# Altium schematic symbol library Diode%.SchLib: 376 symbols (part 7 of 9)
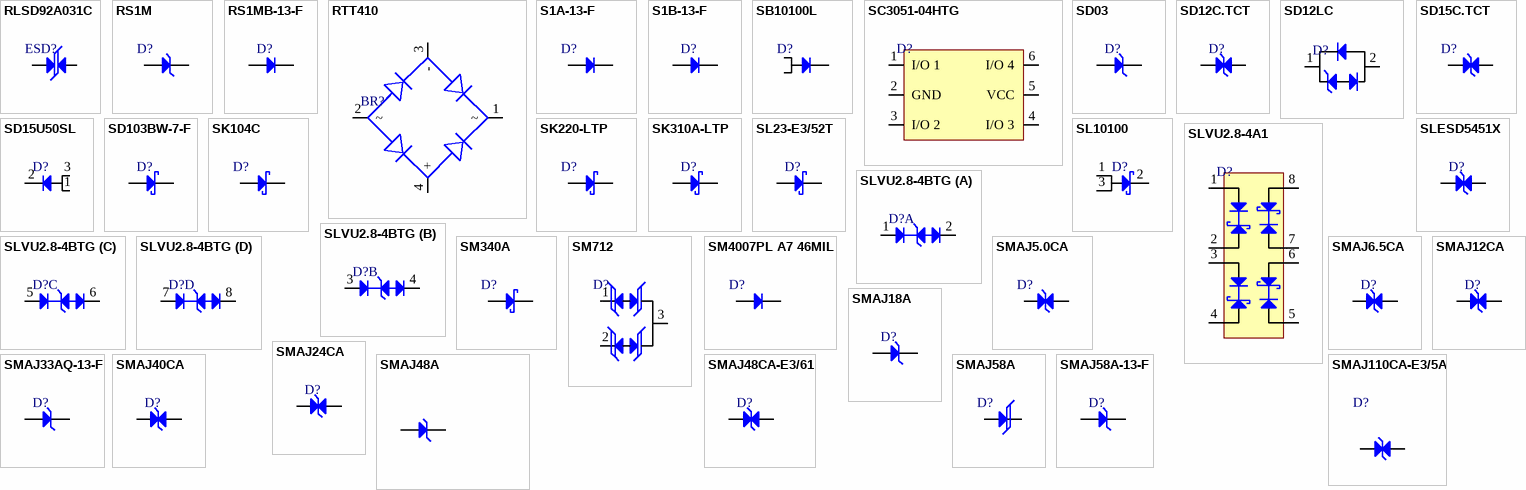
[diagram p15: symbols RLSD92A031C to SMAJ110CA-E3/5A]

## SD103BW-7-F
designator D?
DIODE SCHOTTKY 30V 350MA SOD123; Manufacturer: Diodes; Manufacturer Part Number: SD103BW-7-F; Supplier: Future Electronics; LCSC Part Number: C151400; RoHS: Yes; Item Type: Diodes; Stock: 6000; Pricing: 3000=0.0438, 9000=0.0421, 12000=0.0416, 30000=0.0403, 45000=0.039 (USD); ComponentLink1URL: https://datasheet.ciiva.com/36526/1541925-36526008.pdf?src-supplier=Jameco; ComponentLink1Description: https://datasheet.ciiva.com/36526/1541925-36526008.pdf?src-supplier=Jameco; ComponentLink2URL: https://datasheet.ciiva.com/22695/480042-22695847.pdf?src-supplier=Element14; ComponentLink2Description: https://datasheet.ciiva.com/22695/480042-22695847.pdf?src-supplier=Element14; ComponentLink3URL: https://datasheet.ciiva.com/7964/ds11013-7964329.pdf?src-supplier=Element14; ComponentLink3Description: https://datasheet.ciiva.com/7964/ds11013-7964329.pdf?src-supplier=Element14; ComponentLink4URL: https://datasheet.ciiva.com/912/ds11013-912934.pdf?src-supplier=Digikey; ComponentLink4Description: https://datasheet.ciiva.com/912/ds11013-912934.pdf?src-supplier=Digikey; ComponentLink5URL: https://datasheet.ciiva.com/912/ds11013-912935.pdf?src-supplier=Digikey; ComponentLink5Description: https://datasheet.ciiva.com/912/ds11013-912935.pdf?src-supplier=Digikey
footprint SOD-123
pins: 1 A, 2 K

## SK104C
designator D?
40V 650mV@10A 10A SMC(DO-214AB) Schottky Barrier Diodes (SBD) ROHS; Manufacturer: MDD; Manufacturer Part Number: SK104C; Item Type: Diode; Package: SMC(DO-214AB); LCSC Part Number: C59500; ComponentLink1Description: LCSC; ComponentLink1URL: https://www.lcsc.com/product-detail/Schottky-Barrier-Diodes-SBD_MDD-Microdiode-Electronics-SK104C_C59500.html
footprint SMC
pins: 1 K, 2 A

## SK220-LTP
designator D?
200V 900mV@2A 2A SMB(DO-214AA) Schottky Barrier Diodes (SBD) ROHS; Manufacturer: MCC; Manufacturer Part Number: SK220-LTP; Item Type: Diode; Supplier 1: Mouser; RoHS: Yes; Category: Rectifier Diodes; Stock 1: 5871; Pricing 1: 1=0.47, 10=0.364, 50=0.364, 100=0.227, 1000=0.12, 10000=0.092 (USD); Mounting Technology: Surface Mount; Package Quantity: 3000; Packaging: Tape and Reel; Average Rectified Current: 2A; Max Reverse Voltage (DC): 200V; Series: -; Lead Free: Lead Free; RoHS Compliant: Yes; ComponentLink1URL: https://datasheet.ciiva.com/6377/sk22-lsk220-ldo-214aa-6377942.pdf?src-supplier=Digi-Key; ComponentLink1Description: https://datasheet.ciiva.com/6377/sk22-lsk220-ldo-214aa-6377942.pdf?src-supplier=Digi-Key; Supplier Part Number 1: 833-SK220-LTP; LCSC Part Number: C725397
footprint SMB_
pins: 1 A, 2 K

## SK310A-LTP
designator D?
100V 850mV@3A 3A SMA(DO-214AC) Schottky Diodes ROHS; Manufacturer: MCC(Micro Commercial Components); Manufacturer Part Number: SK310A-LTP; Item Type: Diode; Package: SMA(DO-214AC); LCSC Part Number: C91474; ComponentLink1Description: LCSC; ComponentLink1URL: https://www.lcsc.com/product-detail/Schottky-Diodes_MCC-Micro-Commercial-Components-SK310A-LTP_C91474.html?s_z=n_SK310A
footprint SMA(DO-214AC)
pins: 1 K, 2 A

## SL23-E3/52T
designator D?
DIODE SCHOTTKY 30V 2A DO214AA; Manufacturer: Vishay Semiconductors; Manufacturer Part Number: SL23-E3/52T; Item Type: Diodes; Supplier: Mouser; LCSC Part Number: C2979790; RoHS: Yes; Stock: 2637; Pricing: 1=0.54, 10=0.363, 50=0.363, 100=0.287, 1000=0.143, 10000=0.128 (USD); ComponentLink1URL: http://www.farnell.com/datasheets/2049348.pdf?src-supplier=Farnell; ComponentLink1Description: http://www.farnell.com/datasheets/2049348.pdf?src-supplier=Farnell; ComponentLink2URL: https://www.alliedelec.com/m/d/b938cf501c2dca4289fb9d630ff5a91d.pdf?src-supplier=Allied+Electronics; ComponentLink2Description: https://www.alliedelec.com/m/d/b938cf501c2dca4289fb9d630ff5a91d.pdf?src-supplier=Allied+Electronics; ComponentLink3URL: http://www.mouser.com/ds/2/427/sl22-108295.pdf?src-supplier=Mouser; ComponentLink3Description: http://www.mouser.com/ds/2/427/sl22-108295.pdf?src-supplier=Mouser; ComponentLink4URL: http://uk.rs-online.com/webdocs/0dcf/0900766b80dcfe9f.pdf?src-supplier=Rs; ComponentLink4Description: http://uk.rs-online.com/webdocs/0dcf/0900766b80dcfe9f.pdf?src-supplier=Rs; ComponentLink5URL: http://components.arrow.com/part/dataview/42820641S9655971N5680?src-supplier=Arrow+Electronics; ComponentLink5Description: http://components.arrow.com/part/dataview/42820641S9655971N5680?src-supplier=Arrow+Electronics; ComponentLink6URL: http://www.produktinfo.conrad.com/datenblaetter/575000-599999/596314-da-01-en-DIODE_SCHOTTKY_SL23_E3_52T_DO_214AA_VIS.pdf?src-supplier=Conrad; ComponentLink6Description: http://www.produktinfo.conrad.com/datenblaetter/575000-599999/596314-da-01-en-DIODE_SCHOTTKY_SL23_E3_52T_DO_214AA_VIS.pdf?src-supplier=Conrad; ComponentLink7URL: https://datasheet.octopart.com/SL23-E3-52T-Vishay-datasheet-8479844.pdf?src-supplier=Farnell; ComponentLink7Description: https://datasheet.octopart.com/SL23-E3-52T-Vishay-datasheet-8479844.pdf?src-supplier=Farnell; ComponentLink8URL: http://www.vishay.com/docs/88741/sl22.pdf?src-supplier=Digikey; ComponentLink8Description: http://www.vishay.com/docs/88741/sl22.pdf?src-supplier=Digikey; ComponentLink9URL: https://www.vishay.com/docs/88741/sl22.pdf?src-supplier=Digikey; ComponentLink9Description: https://www.vishay.com/docs/88741/sl22.pdf?src-supplier=Digikey; ComponentLink10URL: https://datasheet.octopart.com/SL23-E3-52T-Vishay-datasheet-28809157.pdf?src-supplier=Future+Electronics; ComponentLink10Description: https://datasheet.octopart.com/SL23-E3-52T-Vishay-datasheet-28809157.pdf?src-supplier=Future+Electronics; ComponentLink11URL: http://www.vishay.com/docs/88741/88741.pdf?src-supplier=Future+Electronics; ComponentLink11Description: http://www.vishay.com/docs/88741/88741.pdf?src-supplier=Future+Electronics; ComponentLink12URL: http://www.farnell.com/datasheets/2049348.pdf?src-supplier=Element14; ComponentLink12Description: http://www.farnell.com/datasheets/2049348.pdf?src-supplier=Element14; ComponentLink13URL: http://www.vishay.com/docs/88741/88741.pdf?src-supplier=Avnet; ComponentLink13Description: http://www.vishay.com/docs/88741/88741.pdf?src-supplier=Avnet; ComponentLink14URL: https://datasheet.octopart.com/SL23-E3-52T-Vishay-datasheet-11758959.pdf?src-supplier=Element14; ComponentLink14Description: https://datasheet.octopart.com/SL23-E3-52T-Vishay-datasheet-11758959.pdf?src-supplier=Element14; ComponentLink15URL: http://www.farnell.com/datasheets/2243773.pdf?src-supplier=Newark; ComponentLink15Description: http://www.farnell.com/datasheets/2243773.pdf?src-supplier=Newark; ComponentLink16URL: http://docs-usa.electrocomponents.com/techlib:/itc_doclist_US.htm?stockno=7000940&src-supplier=Allied+Electronics; ComponentLink16Description: http://docs-usa.electrocomponents.com/techlib:/itc_doclist_US.htm?stockno=7000940&src-supplier=Allied+Electronics; ComponentLink17URL: https://datasheet.octopart.com/SL23-E3-52T-Vishay-datasheet-124739981.pdf?src-supplier=TME; ComponentLink17Description: https://datasheet.octopart.com/SL23-E3-52T-Vishay-datasheet-124739981.pdf?src-supplier=TME
footprint DO-214AA (SMB)
pins: 1 K, 2 A

## SL10100
designator D?
100V Dual Common Cathode 10A 670mV@10A TO-277 Schottky Barrier Diodes (SBD) ROHS; Manufacturer: GOODWORK; Manufacturer Part Number: SL10100; Item Type: Diode; Package: TO-277; LCSC Part Number: C2903949; ComponentLink1Description: LCSC; ComponentLink1URL: https://www.lcsc.com/product-detail/Schottky-Barrier-Diodes-SBD_GOODWORK-SL10100_C2903949.html
footprint TO-277
pins: 1 A, 2 K, 3 A

## SLESD5451X
designator D?
60W 5.6V Bidirectional 5V DFN1006 ESD and Surge Protection (TVS/ESD) ROHS; Manufacturer: Slkor(SLKORMICRO Elec.); Manufacturer Part Number: SLESD5451X; Package: DFN1006; LCSC Part Number: C5185982; Item Type: TVS/ESD; ComponentLink1Description: LCSC; ComponentLink1URL: https://www.lcsc.com/product-detail/ESD-and-Surge-Protection-TVS-ESD_Slkor-SLKORMICRO-Elec-SLESD5451X_C5185982.html?s_z=n_SLESD5451X
footprint DFN1006-2L (Bi-Directional)
pins: 1 A, 2 A

## SLVU2.8-4A1
designator D?
TVS DIODE 2.8VWM 15VC 8-SOIC; Manufacturer: STMicroelectronics; Manufacturer Part Number: SLVU2.8-4A1; Package: 8-SOIC; LCSC Part Number: C669891; Item Type: TVS Diode; ComponentLink1Description: LCSC; ComponentLink1URL: https://www.lcsc.com/product-detail/C669891.html?s_z=n_SLVU2.8-4A1
footprint SOIC-8(0.154", 3.90mm Width)
pins: 1, 2, 3, 4, 5, 6, 7, 8

## SLVU2.8-4BTG
designator D?
TVS DIODE 2.8VWM 15VC 8-SOIC; Manufacturer: Littelfuse; Manufacturer Part Number: SLVU2.8-4BTG; Item Type: TVS Diodes; Supplier: Mouser; LCSC Part Number: C2763559; RoHS: Yes; Stock: 4572; Pricing: 1=1.79, 10=1.5, 50=1.5, 100=1.11, 1000=0.899, 10000=0.832 (USD); ComponentLink1URL: https://datasheet.ciiva.com/6578/littelfusetvsdiodearrayslvu284-6578256.pdf?src-supplier=Digikey; ComponentLink1Description: https://datasheet.ciiva.com/6578/littelfusetvsdiodearrayslvu284-6578256.pdf?src-supplier=Digikey; ComponentLink2URL: https://datasheet.ciiva.com/15186/getdatasheetpartid-492857-15186609.pdf?src-supplier=Verical; ComponentLink2Description: https://datasheet.ciiva.com/15186/getdatasheetpartid-492857-15186609.pdf?src-supplier=Verical; ComponentLink3URL: https://datasheet.ciiva.com/4507/littelfuse-tvs-diode-array-slvu2-8-4-64488-4507717.pdf?src-supplier=Mouser; ComponentLink3Description: https://datasheet.ciiva.com/4507/littelfuse-tvs-diode-array-slvu2-8-4-64488-4507717.pdf?src-supplier=Mouser; ComponentLink4URL: https://datasheet.ciiva.com/6578/littelfuse-tvs-diode-array-slvu2-8-4-datasheet-pdf-6578252.pdf?src-supplier=Digikey; ComponentLink4Description: https://datasheet.ciiva.com/6578/littelfuse-tvs-diode-array-slvu2-8-4-datasheet-pdf-6578252.pdf?src-supplier=Digikey; ComponentLink5URL: https://datasheet.ciiva.com/6578/littelfuse-tvs-diode-array-slvu2-8-4-datasheet-pdf-6578255.pdf?src-supplier=Digikey; ComponentLink5Description: https://datasheet.ciiva.com/6578/littelfuse-tvs-diode-array-slvu2-8-4-datasheet-pdf-6578255.pdf?src-supplier=Digikey
footprint SOIC-8(0.154", 3.90mm Width)
part A pins: 1 A, 2 K
part B pins: 3 A, 4 K
part C pins: 5 A, 6 K
part D pins: 7 A, 8 K

## SM340A
designator D?
40V Single 500mV@3A 3A SMA Schottky Barrier Diodes (SBD) ROHS; Manufacturer: LRC; Manufacturer Part Number: SM340A; Item Type: Schottky Diode; Package: SMA; LCSC Part Number: C383313; ComponentLink1Description: LCSC; ComponentLink1URL: https://www.lcsc.com/product-detail/Schottky-Barrier-Diodes-SBD_LRC-SM340A_C383313.html
footprint SMA
pins: 1 K, 2 A

## SM712
designator D?
SOT-23 TVS ROHS; Manufacturer: TECH PUBLIC; Manufacturer Part Number: SM712; Item Type: Diode; Package: SOT-23; LCSC Part Number: C521963; ComponentLink1Description: LCSC; ComponentLink1URL: https://www.lcsc.com/product-detail/TVS_TECH-PUBLIC-SM712_C521963.html
footprint SOT-23 (TRANS NPN 40V 0.6A SOT23)
pins: 1 I/O1, 2 I/O2, 3 GND

## SM4007PL A7 46MIL
designator D?
900mA 1.1V@1A 1kV SOD-123FL Diodes - General Purpose ROHS; Manufacturer: YONGYUTAI; Manufacturer Part Number: SM4007PL A7 46MIL; Item Type: Diode; Package: SOD-123FL; LCSC Part Number: C2916249; ComponentLink1Description: LCSC; ComponentLink1URL: https://www.lcsc.com/product-detail/Diodes-General-Purpose_YONGYUTAI-SM4007PL-A7-46MIL_C2916249.html
footprint SOD-123FL
pins: 1 K, 2 A

## SMAJ5.0CA
designator D?
TVS DIODE 5VWM 9.2VC SMA; Manufacturer: FTR; Manufacturer Part Number: SMAJ5.0CA; Package: SMA(DO-214AC); Item Type: Diode; LCSC Part Number: C693487; ComponentLink1Description: LCSC; ComponentLink1URL: https://www.lcsc.com/product-detail/TVS_GOODWORK-SMAJ5-0CA_C908809.html
footprint SMA Bi Directional
pins: 1 A, 2 K

## SMAJ6.5CA
designator D?
TVS DIODE 6.5VWM 11.2VC DO214AC; Manufacturer: Littelfuse; Manufacturer Part Number: SMAJ6.5CA; Reverse Standoff Voltage: 6.5V; Min Breakdown Voltage: 7.22V; Polarity: Bidirectional; Peak Pulse Current: 35.7A; Peak Pulse Power: 400W; Test Current: 10mA; Number of Bidirectional Channels: 1; Clamping Voltage: 11.2V; Power Line Protection: No; Diode Type: ZENER; Max Breakdown Voltage: 7.98V; Max Power Dissipation: 3.3W; Leakage Current: 1mA; Supplier 1: Arrow Electronics; RoHS: Yes; Category: TVS Diodes; Stock 1: 45000; Pricing 1: 5000=0.0893, 10000=0.0814, 25000=0.0761, 50000=0.0683, 125000=0.0656 (USD); Mounting Technology: Surface Mount; Case/Package: DO-214AC; Pins: 2; Min Operating Temperature: -65°C; Max Operating Temperature: 150°C; Packaging: Tape and Reel; Breakdown Voltage: 7.22V; Package Quantity: 5000; Max Surge Current: 35.7A; Series: SMAJ; Direction: Bidirectional; Operating Supply Voltage: 6.5V; Number of Channels: 1; Termination: SMD/SMT; Voltage Rating (DC): 6.5V; Reverse Breakdown Voltage: 7.22V; Number of Elements: 1; Power Dissipation: 400W; Clamping Voltage-Max: 11.2V; Length: 5.28mm; Width: 2.79mm; Height: 2.29mm; RoHS Compliant: Yes; Lead Free: Lead Free; Reach SVHC Compliant: No; ComponentLink1URL: https://datasheet.ciiva.com/340/littelfuse-tvs-diode-smaj-datasheet-pdf-340656.pdf?src-supplier=Digi-Key; ComponentLink1Description: https://datasheet.ciiva.com/340/littelfuse-tvs-diode-smaj-datasheet-pdf-340656.pdf?src-supplier=Digi-Key; ComponentLink2URL: https://datasheet.ciiva.com/340/littelfuse-tvs-diode-smaj-datasheet-pdf-340657.pdf?src-supplier=Digi-Key; ComponentLink2Description: https://datasheet.ciiva.com/340/littelfuse-tvs-diode-smaj-datasheet-pdf-340657.pdf?src-supplier=Digi-Key; ComponentLink3URL: https://datasheet.ciiva.com/16391/littelfuse-tvs-diode-smaj-16391802.pdf?src-supplier=Future+Electronics; ComponentLink3Description: https://datasheet.ciiva.com/16391/littelfuse-tvs-diode-smaj-16391802.pdf?src-supplier=Future+Electronics; ComponentLink4URL: https://datasheet.ciiva.com/340/littelfuse-tvs-diode-smaj-datasheet-pdf-340655.pdf?src-supplier=Digi-Key; ComponentLink4Description: https://datasheet.ciiva.com/340/littelfuse-tvs-diode-smaj-datasheet-pdf-340655.pdf?src-supplier=Digi-Key; Supplier Part Number 1: SMAJ6.5CA; LCSC Part Number: C83330; Item Type: Diode
footprint SMA Bi Directional
pins: 1 A, 2 K

## SMAJ12CA
designator D?
20.1A 19.9V 13.3V 12V SMA(DO-214AC) Electrostatic and Surge Protection (TVS/ESD) ROHS; Manufacturer: MDD; Manufacturer Part Number: SMAJ12CA; Package: SMA(DO-214AC); LCSC Part Number: C110042; Item Type: (TVS/ESD); ComponentLink1Description: LCSC; ComponentLink1URL: https://www.lcsc.com/product-detail/Electrostatic-and-Surge-Protection-TVS-ESD_MDD-Microdiode-Semiconductor-SMAJ12CA_C110042.html
footprint SMA Bi Directional
pins: 1 A, 2 K

## SMAJ18A
designator D?
13.7A 400W 29.2V 20V Unidirectional 18V SMA(DO-214AC) Electrostatic and Surge Protection (TVS/ESD) ROHS; Manufacturer: SMC; Manufacturer Part Number: SMAJ18A; Package: SMA(DO-214AC); LCSC Part Number: C499735; Item Type: TVS/ESD; ComponentLink1Description: LCSC; ComponentLink1URL: https://www.lcsc.com/product-detail/Electrostatic-and-Surge-Protection-TVS-ESD_SMC-Sangdest-Microelectronicstronic-Nanjing-SMAJ18A_C499735.html
footprint SMA(DO-214AC)
pins: 1 K, 2 A

## SMAJ24CA
designator D?
TVS DIODE 24VWM 38.9VC DO214AC; Manufacturer: Littelfuse; Manufacturer Part Number: SMAJ24CA; Item Type: TVS Diodes; Peak Pulse Power: 400W; Reverse Standoff Voltage: 24V; Min Breakdown Voltage: 26.7V; Peak Pulse Current: 10.3A; Polarity: Bidirectional; Clamping Voltage: 38.9V; Test Current: 1mA; Number of Bidirectional Channels: 1; Power Line Protection: No; Max Power Dissipation: 3.3W; Leakage Current: 1uA; Diode Type: ZENER; Max Breakdown Voltage: 29.5V; Supplier: Digikey; LCSC Part Number: C148223; RoHS: Yes; Stock: 31613; Pricing: 1=0.31, 10=0.21, 100=0.104, 500=0.1, 1000=0.099, 2000=0.09895 (USD); Mounting Technology: Surface Mount; Case/Package: DO-214AC; Pins: 2; Min Operating Temperature: -65°C; Max Operating Temperature: 150°C; Packaging: Tape and Reel; Series: SMAJ; Direction: Bidirectional; Reverse Breakdown Voltage: 26.7V; Number of Elements: 1; Voltage Rating (DC): 24V; Max Reverse Leakage Current: 1uA; Power Dissipation: 400W; Clamping Voltage-Max: 38.9V; Reverse Voltage: 24V; Length: 5.28mm; Width: 2.79mm; Height: 2.29mm; RoHS Compliant: Yes; Lead Free: Lead Free; Reach SVHC Compliant: No; ComponentLink1URL: https://datasheet.ciiva.com/28473/607617-28473406.pdf?src-supplier=Element14; ComponentLink1Description: https://datasheet.ciiva.com/28473/607617-28473406.pdf?src-supplier=Element14; ComponentLink2URL: https://datasheet.ciiva.com/331/littelfuse-tvs-diode-smaj-datasheet-pdf-331049.pdf?src-supplier=Digikey; ComponentLink2Description: https://datasheet.ciiva.com/331/littelfuse-tvs-diode-smaj-datasheet-pdf-331049.pdf?src-supplier=Digikey; ComponentLink3URL: https://datasheet.ciiva.com/331/littelfuse-tvs-diode-smaj-datasheet-pdf-331050.pdf?src-supplier=Digikey; ComponentLink3Description: https://datasheet.ciiva.com/331/littelfuse-tvs-diode-smaj-datasheet-pdf-331050.pdf?src-supplier=Digikey; ComponentLink4URL: https://datasheet.ciiva.com/331/littelfuse-tvs-diode-smaj-datasheet-pdf-331048.pdf?src-supplier=Digikey; ComponentLink4Description: https://datasheet.ciiva.com/331/littelfuse-tvs-diode-smaj-datasheet-pdf-331048.pdf?src-supplier=Digikey
footprint SMA Bi Directional
pins: 1 A, 2 K

## SMAJ33AQ-13-F
designator D?
TVS DIODE 33VWM 53.3VC SMA; Manufacturer: Diodes; Manufacturer Part Number: SMAJ33AQ-13-F; Supplier: Arrow Electronics; Supplier Part Number: SMAJ33AQ-13-F; RoHS: Yes; Category: TVS Diodes; Stock: 265000; Pricing: 5000=0.0823, 10000=0.0749, 25000=0.0742, 50000=0.0735 (USD); RoHS Compliant: Yes; ComponentLink1URL: https://www.diodes.com/assets/Datasheets/ds40739.pdf?src-supplier=Digikey; ComponentLink1Description: https://www.diodes.com/assets/Datasheets/ds40739.pdf?src-supplier=Digikey; LCSC Part Number: C1974485; Item Type: Diode
footprint SMA
pins: 1 K, 2 A

## SMAJ40CA
designator D?
64.5V 44.4V 40V SMA(DO-214AC) TVS ROHS; Manufacturer: MDD; Manufacturer Part Number: SMAJ40CA; Item Type: TVS Diode; Package: SMA(DO-214AC); LCSC Part Number: C113970; ComponentLink1Description: LCSC; ComponentLink1URL: https://www.lcsc.com/product-detail/TVS_MDD-Microdiode-Electronics-SMAJ40CA_C113970.html
footprint SMA Bi Directional
pins: 1 A, 2 K

## SMAJ48A
designator D?
TVS DIODE 48VWM 77.4VC DO214AC; Manufacturer: Littelfuse; Manufacturer Part Number: SMAJ48A; Polarity: Unidirectional; Breakdown Voltage: 53.3V; Peak Pulse Power: 400W; Reverse Standoff Voltage: 48V; Peak Pulse Current: 5.2A; Clamping Voltage: 77.4V; Number of Unidirectional Channels: 1; Power Line Protection: No; Test Current: 1mA; Diode Type: ZENER; Max Power Dissipation: 3.3W; Leakage Current: 1uA; Max Breakdown Voltage: 58.9V; Package: SMA(DO-214AC); LCSC Part Number: C223991; Item Type: TVS  Diode; ComponentLink1Description: LCSC; Supplier: Rs; Supplier Part Number: 1719659; RoHS: Yes; Category: TVS Diodes; Stock: 2975; Pricing: 25=0.231, 100=0.214, 500=0.209, 1000=0.204 (GBP); Mounting Technology: Surface Mount; Case/Package: DO-214AC; Pins: 2; Min Operating Temperature: -65°C; Max Operating Temperature: 150°C; Min Breakdown Voltage: 53.3V; Packaging: Tape and Reel; Package Quantity: 5000; Max Surge Current: 5.2A; Series: SMAJ; Operating Supply Voltage: 48V; Direction: Unidirectional; Termination: SMD/SMT; Number of Channels: 1; Reverse Breakdown Voltage: 53.3V; Number of Elements: 1; Voltage Rating (DC): 48V; Power Dissipation: 400W; Clamping Voltage-Max: 77.4V; Length: 5.28mm; Width: 2.79mm; Height: 2.29mm; RoHS Compliant: Yes; Reach SVHC Compliant: No; Lead Free: Lead Free; ComponentLink2URL: https://datasheet.ciiva.com/28649/607617-28649159.pdf?src-supplier=Element14; ComponentLink2Description: https://datasheet.ciiva.com/28649/607617-28649159.pdf?src-supplier=Element14; ComponentLink3URL: https://datasheet.ciiva.com/16391/littelfuse-tvs-diode-smaj-16391798.pdf?src-supplier=Future+Electronics; ComponentLink3Description: https://datasheet.ciiva.com/16391/littelfuse-tvs-diode-smaj-16391798.pdf?src-supplier=Future+Electronics; ComponentLink4URL: https://datasheet.ciiva.com/330/littelfuse-tvs-diode-smaj-datasheet-pdf-330802.pdf?src-supplier=Digi-Key; ComponentLink4Description: https://datasheet.ciiva.com/330/littelfuse-tvs-diode-smaj-datasheet-pdf-330802.pdf?src-supplier=Digi-Key; ComponentLink5URL: https://datasheet.ciiva.com/330/littelfuse-tvs-diode-smaj-datasheet-pdf-330803.pdf?src-supplier=Digi-Key; ComponentLink5Description: https://datasheet.ciiva.com/330/littelfuse-tvs-diode-smaj-datasheet-pdf-330803.pdf?src-supplier=Digi-Key; ComponentLink6URL: https://datasheet.ciiva.com/330/littelfuse-tvs-diode-smaj-datasheet-pdf-330804.pdf?src-supplier=Digi-Key; ComponentLink6Description: https://datasheet.ciiva.com/330/littelfuse-tvs-diode-smaj-datasheet-pdf-330804.pdf?src-supplier=Digi-Key
footprint SMA
pins: 1 K, 2 A

## SMAJ48CA-E3/61
designator D?
TVS DIODE 48VWM 77.4VC DO214AC; Manufacturer: Vishay Semiconductors; Manufacturer Part Number: SMAJ48CA-E3/61; Item Type: TVS Diodes; Supplier: Mouser; LCSC Part Number: C1973118; RoHS: Yes; Stock: 8896; Pricing: 1=0.35, 10=0.202, 50=0.202, 100=0.099, 1000=0.099, 10000=0.072 (USD); ComponentLink1URL: https://datasheet.ciiva.com/23942/1761247-23942001.pdf?src-supplier=Newark; ComponentLink1Description: https://datasheet.ciiva.com/23942/1761247-23942001.pdf?src-supplier=Newark; ComponentLink2URL: https://datasheet.ciiva.com/22636/548547-22636982.pdf?src-supplier=Element14; ComponentLink2Description: https://datasheet.ciiva.com/22636/548547-22636982.pdf?src-supplier=Element14
footprint SMA Bi Directional
pins: 1 A, 2 A

## SMAJ58A
designator D?
93.6V 64.4V 58V SMA(DO-214AC) TVS ROHS; Manufacturer: Yangzhou Yangjie Elec Tech; Manufacturer Part Number: SMAJ58A; Item Type: Diode; Package: SMA(DO-214AC); LCSC Part Number: C698958; ComponentLink1Description: LCSC; ComponentLink1URL: https://www.lcsc.com/product-detail/TVS_Yangzhou-Yangjie-Elec-Tech-SMAJ58A_C698958.html
footprint SMA
pins: 1 K, 2 K

## SMAJ58A-13-F
designator D?
TVS DIODE 58VWM 93.6VC SMA; Manufacturer: Diodes; Manufacturer Part Number: SMAJ58A-13-F; Supplier: Future Electronics; LCSC Part Number: C110521; RoHS: Yes; Item Type: Diode; Stock: 620000; Pricing: 5000=0.0498, 15000=0.0479, 20000=0.0474, 50000=0.046, 75000=0.0445 (USD); Lead Free: 5697LeadFree; ComponentLink1URL: http://www.mouser.com/ds/2/115/ds19005-73607.pdf?src-supplier=Mouser; ComponentLink1Description: http://www.mouser.com/ds/2/115/ds19005-73607.pdf?src-supplier=Mouser; ComponentLink2URL: http://uk.rs-online.com/webdocs/104b/0900766b8104bf0a.pdf?src-supplier=Rs; ComponentLink2Description: http://uk.rs-online.com/webdocs/104b/0900766b8104bf0a.pdf?src-supplier=Rs
footprint SMA
pins: 1 K, 2 A

## SMAJ110CA-E3/5A
designator D?
TVS DIODE 110VWM 177VC DO214AC; Manufacturer: Vishay; Manufacturer Part Number: SMAJ110CA-E3/5A; Item Type: TVS Diodes; Breakdown Voltage: 128.5V; Clamping Voltage: 177V; Direction: Bidirectional; Element Configuration: Single; Leakage Current: 1µA; Max Breakdown Voltage: 135V; Max Forward Surge Current (Ifsm): 40A; Max Power Dissipation: 3.3W; Max Surge Current: 1.7A; Min Breakdown Voltage: 122V; Number of Bidirectional Channels: 1; Operating Supply Voltage: 110V; Peak Pulse Power: 300W; Power Line Protection: No; Test Current: 1mA; Supplier: DigiKey; LCSC Part Number: C6229597; RoHS: Compliant; Pricing: 7500=0.09372, 15000=0.08595, 22500=0.08198, 37500=0.07753, 52500=0.07489, 75000=0.07233 (USD); Case/Package: SMA; China RoHS: Non-Compliant; Composition: Zener; Lifecycle Status: Production; Max Operating Temperature: 150°C; Max Reverse Leakage Current: 1µA; Min Operating Temperature: -55°C; Number of Channels: 1; Number of Elements: 1; Pins: 2; Number of Terminals: 2; Packaging: Tape and Reel; Peak Pulse Current: 1.7A; Peak Reverse Current: 1µA; Polarity: Bidirectional; REACH SVHC: No; Reverse Breakdown Voltage: 122V; Reverse Standoff Voltage: 110V; ComponentLink1URL: https://datasheet.octopart.com:443/SMAJ110CA-E3-5A-Vishay-datasheet-155938759.pdf?src-supplier=IHS; ComponentLink1Description: https://datasheet.octopart.com:443/SMAJ110CA-E3-5A-Vishay-datasheet-155938759.pdf?src-supplier=IHS; ComponentLink2URL: https://datasheet.octopart.com:443/SMAJ110CA-E3-5A-Vishay-Semiconductor-datasheet-15599035.pdf?src-supplier=Upverter; ComponentLink2Description: https://datasheet.octopart.com:443/SMAJ110CA-E3-5A-Vishay-Semiconductor-datasheet-15599035.pdf?src-supplier=Upverter; ComponentLink3URL: http://sigma.octopart.com:80/rohs_statement/Vishay-company-15.pdf?src-supplier=Compliance+Statements; ComponentLink3Description: http://sigma.octopart.com:80/rohs_statement/Vishay-company-15.pdf?src-supplier=Compliance+Statements
footprint SMA Bi Directional
pins: 1 A, 2 A

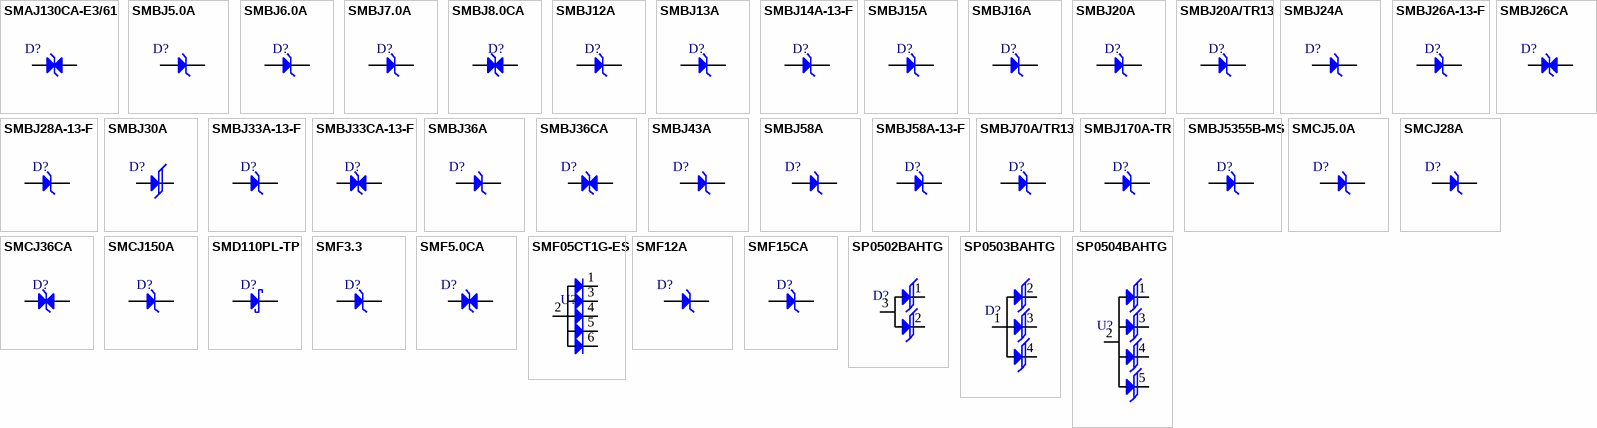
[diagram p7: symbols SMAJ130CA-E3/61 to SP0504BAHTG]

## SMAJ130CA-E3/61
designator D?
TVS DIODE 130VWM 209VC DO214AC; Manufacturer: Vishay; Manufacturer Part Number: SMAJ130CA-E3/61; Item Type: TVS Diodes; Breakdown Voltage: 151.5V; Clamping Voltage: 209V; Current: 40A; Direction: Bidirectional; Element Configuration: Single; Leakage Current: 1µA; Max Breakdown Voltage: 159V; Max Power Dissipation: 3.3W; Max Surge Current: 1.4A; Min Breakdown Voltage: 144V; Number of Channels: 1; Operating Supply Voltage: 130V; Peak Pulse Power: 300W; Power Dissipation: 400W; Test Current: 1mA; Supplier: Avnet; LCSC Part Number: C1973974; RoHS: Compliant; Stock: 3600; Pricing: 3600=0.04777, 7200=0.04688, 14400=0.04656, 28800=0.04632, 57600=0.04608 (USD); Case/Package: SMA; China RoHS: Non-Compliant; Height: 2.087mm; Lead Free: Lead Free; Length: 4.5mm; Lifecycle Status: Production; Max Forward Surge Current (Ifsm): 40A; Max Operating Temperature: 150°C; Max Reverse Leakage Current: 1µA; Min Operating Temperature: -55°C; Number of Elements: 1; Pins: 2; Number of Terminals: 2; Packaging: Tape and Reel; Peak Pulse Current: 1.4A; Peak Reverse Current: 1µA; Polarity: Bidirectional; Radiation Hardening: No; REACH SVHC: No; Reverse Breakdown Voltage: 144V; Reverse Standoff Voltage: 130V; Schedule B: 8541100080, 8541100080|8541100080|8541100080|8541100080|8541100080; Voltage: 130V; Width: 2.79mm; ComponentLink1URL: https://datasheet.octopart.com:443/SMAJ130CA-E3-61-Vishay-datasheet-155938759.pdf?src-supplier=IHS; ComponentLink1Description: https://datasheet.octopart.com:443/SMAJ130CA-E3-61-Vishay-datasheet-155938759.pdf?src-supplier=IHS; ComponentLink2URL: https://datasheet.octopart.com:443/SMAJ130CA-E3-61-Vishay-datasheet-15599035.pdf?src-supplier=Upverter; ComponentLink2Description: https://datasheet.octopart.com:443/SMAJ130CA-E3-61-Vishay-datasheet-15599035.pdf?src-supplier=Upverter; ComponentLink3URL: https://datasheet.octopart.com:443/SMAJ130CA-E3/61-Vishay-datasheet-11547941.pdf?src-supplier=Future+Electronics; ComponentLink3Description: https://datasheet.octopart.com:443/SMAJ130CA-E3/61-Vishay-datasheet-11547941.pdf?src-supplier=Future+Electronics; ComponentLink4URL: https://datasheet.octopart.com:443/SMAJ130CA-E3/61-Vishay-datasheet-8368083.pdf?src-supplier=Future+Electronics; ComponentLink4Description: https://datasheet.octopart.com:443/SMAJ130CA-E3/61-Vishay-datasheet-8368083.pdf?src-supplier=Future+Electronics; ComponentLink5URL: https://datasheet.octopart.com:443/SMAJ130CA-E3/61-Vishay-datasheet-5313693.pdf?src-supplier=Future+Electronics; ComponentLink5Description: https://datasheet.octopart.com:443/SMAJ130CA-E3/61-Vishay-datasheet-5313693.pdf?src-supplier=Future+Electronics; ComponentLink6URL: https://datasheet.octopart.com:443/SMAJ130CA-E3-61-Vishay-Siliconix-datasheet-62309719.pdf?src-supplier=RS+(Formerly+Allied+Electronics); ComponentLink6Description: https://datasheet.octopart.com:443/SMAJ130CA-E3-61-Vishay-Siliconix-datasheet-62309719.pdf?src-supplier=RS+(Formerly+Allied+Electronics); ComponentLink7URL: http://sigma.octopart.com:80/rohs_statement/Vishay-company-15.pdf?src-supplier=Compliance+Statements; ComponentLink7Description: http://sigma.octopart.com:80/rohs_statement/Vishay-company-15.pdf?src-supplier=Compliance+Statements
footprint SMA Bi Directional
pins: 1 A, 2 A

## SMBJ5.0A
designator D?
65.2A 9.2V 6.4V 5V Unidirectional SMB TVS ROHS; Manufacturer: AnBon; Manufacturer Part Number: SMBJ5.0A; Item Type: Diode; LCSC Part Number: C440263; Package: SMB; ComponentLink7Description: LCSC; ComponentLink7URL: https://www.lcsc.com/product-detail/TVS_AnBon-SMBJ5-0A_C440263.html
footprint SMB_
pins: 1 A, 2 K

## SMBJ6.0A
designator D?
58.26A 600W 10.3V 6.67V 6V SMB ESD and Surge Protection (TVS/ESD) ROHS; Manufacturer: MSKSEMI; Manufacturer Part Number: SMBJ6.0A; Package: SMB; LCSC Part Number: C5331096; Item Type: TVS/ESD; ComponentLink1Description: LCSC; ComponentLink1URL: https://www.lcsc.com/product-detail/ESD-and-Surge-Protection-TVS-ESD_MSKSEMI-SMBJ6-0A_C5331096.html
footprint SMB_
pins: 1 A, 2 K

## SMBJ7.0A
designator D?
50A 600W 12V 7.78V 7V SMB Electrostatic and Surge Protection (TVS/ESD) ROHS; Manufacturer: Slkor; Manufacturer Part Number: SMBJ7.0A; Package: SMB; LCSC Part Number: C3019967; Item Type: (TVS/ESD); ComponentLink1Description: LCSC; ComponentLink1URL: https://www.lcsc.com/product-detail/Electrostatic-and-Surge-Protection-TVS-ESD_Slkor-SLKORMICRO-Elec-SMBJ7-0A_C3019967.html
footprint SMB_
pins: 1 A, 2 K

## SMBJ8.0CA
designator D?
TVS DIODE 8VWM 13.6VC DO214AA; Manufacturer: Littelfuse; Manufacturer Part Number: SMBJ8.0CA; Item Type: TVS Diodes; Peak Pulse Power: 600W; Clamping Voltage: 13.6V; Reverse Standoff Voltage: 8V; Peak Pulse Current: 44.2A; Test Current: 1mA; Polarity: Bidirectional; Number of Bidirectional Channels: 1; Min Breakdown Voltage: 8.89V; Power Line Protection: No; Leakage Current: 100uA; Diode Type: ZENER; Max Breakdown Voltage: 9.83V; Supplier: Digikey; LCSC Part Number: C224029; RoHS: Yes; Stock: 5825; Pricing: 1=0.52, 10=0.321, 100=0.2038, 500=0.15312, 1000=0.13674 (USD); Mounting Technology: Surface Mount; Case/Package: DO-214AA; Pins: 2; Min Operating Temperature: -65°C; Max Operating Temperature: 150°C; Packaging: Cut Tape; Reverse Breakdown Voltage: 8.89V; Number of Elements: 1; Series: SMBJ; Direction: Bidirectional; Voltage Rating (DC): 8V; Max Power Dissipation: 600W; Power Dissipation: 600W; Clamping Voltage-Max: 13.6V; Length: 5.59mm; Width: 3.94mm; Height: 2.44mm; RoHS Compliant: Yes; Lead Free: Lead Free; Reach SVHC Compliant: No; ComponentLink1URL: https://datasheet.ciiva.com/8062/littelfuse-tvs-diode-smbj-8062558.pdf?src-supplier=Element14; ComponentLink1Description: https://datasheet.ciiva.com/8062/littelfuse-tvs-diode-smbj-8062558.pdf?src-supplier=Element14; ComponentLink2URL: https://datasheet.ciiva.com/331/littelfuse-tvs-diode-smbj-datasheet-pdf-331629.pdf?src-supplier=Digikey; ComponentLink2Description: https://datasheet.ciiva.com/331/littelfuse-tvs-diode-smbj-datasheet-pdf-331629.pdf?src-supplier=Digikey; ComponentLink3URL: https://datasheet.ciiva.com/331/littelfuse-tvs-diode-smbj-datasheet-pdf-331630.pdf?src-supplier=Digikey; ComponentLink3Description: https://datasheet.ciiva.com/331/littelfuse-tvs-diode-smbj-datasheet-pdf-331630.pdf?src-supplier=Digikey; ComponentLink4URL: https://datasheet.ciiva.com/331/littelfuse-tvs-diode-smbj-datasheet-pdf-331628.pdf?src-supplier=Digikey; ComponentLink4Description: https://datasheet.ciiva.com/331/littelfuse-tvs-diode-smbj-datasheet-pdf-331628.pdf?src-supplier=Digikey
footprint SMB Bi Directional
pins: 1 A, 2 A

## SMBJ12A
designator D?
TVS DIODE 12VWM 19.9VC DO214AA; Manufacturer: Littelfuse; Manufacturer Part Number: SMBJ12A; Item Type: TVS Diodes; Supplier: Digikey; LCSC Part Number: C151251; RoHS: Yes; Stock: 39718; Pricing: 1=0.32, 10=0.215, 100=0.104 (USD); ComponentLink1URL: https://datasheet.ciiva.com/15143/getdatasheetpartid-185160-15143884.pdf?src-supplier=Verical; ComponentLink1Description: https://datasheet.ciiva.com/15143/getdatasheetpartid-185160-15143884.pdf?src-supplier=Verical; ComponentLink2URL: https://datasheet.ciiva.com/34302/1546611-34302457.pdf?src-supplier=Jameco; ComponentLink2Description: https://datasheet.ciiva.com/34302/1546611-34302457.pdf?src-supplier=Jameco; ComponentLink3URL: https://datasheet.ciiva.com/25624/0900766b810f4eeb-25624681.pdf?src-supplier=Rs; ComponentLink3Description: https://datasheet.ciiva.com/25624/0900766b810f4eeb-25624681.pdf?src-supplier=Rs; ComponentLink4URL: https://datasheet.ciiva.com/16287/littelfuse-tvs-diode-smbj-16287565.pdf?src-supplier=Future+Electronics; ComponentLink4Description: https://datasheet.ciiva.com/16287/littelfuse-tvs-diode-smbj-16287565.pdf?src-supplier=Future+Electronics; ComponentLink5URL: https://datasheet.ciiva.com/331/littelfuse-tvs-diode-smbj-datasheet-pdf-331137.pdf?src-supplier=Digikey; ComponentLink5Description: https://datasheet.ciiva.com/331/littelfuse-tvs-diode-smbj-datasheet-pdf-331137.pdf?src-supplier=Digikey; ComponentLink6URL: https://datasheet.ciiva.com/331/littelfuse-tvs-diode-smbj-datasheet-pdf-331138.pdf?src-supplier=Digikey; ComponentLink6Description: https://datasheet.ciiva.com/331/littelfuse-tvs-diode-smbj-datasheet-pdf-331138.pdf?src-supplier=Digikey; ComponentLink7URL: https://datasheet.ciiva.com/331/littelfuse-tvs-diode-smbj-datasheet-pdf-331139.pdf?src-supplier=Digikey; ComponentLink7Description: https://datasheet.ciiva.com/331/littelfuse-tvs-diode-smbj-datasheet-pdf-331139.pdf?src-supplier=Digikey; ComponentLink8URL: https://datasheet.ciiva.com/8062/littelfuse-tvs-diode-smbj-8062301.pdf?src-supplier=Element14; ComponentLink8Description: https://datasheet.ciiva.com/8062/littelfuse-tvs-diode-smbj-8062301.pdf?src-supplier=Element14
footprint SMB_
pins: 1 A, 2 K

## SMBJ13A
designator D?
TVS DIODE 13VWM 21.5VC DO214AA; Manufacturer: Littelfuse; Manufacturer Part Number: SMBJ13A; Item Type: TVS Diodes; Body Material: Metal; Breakdown Voltage: 15.15V; Clamping Voltage: 21.5V; Direction: Unidirectional; Forward Voltage: 3.5V; Leakage Current: 1µA; Max Breakdown Voltage: 15.9V; Max Power Dissipation: 5W; Max Surge Current: 28A; Min Breakdown Voltage: 14.4V; Number of Channels: 1; Number of Contacts: 3; Operating Supply Voltage: 13V; Peak Pulse Power: 600W; Power Line Protection: No; Test Current: 1mA; Supplier: DigiKey; LCSC Part Number: C151252; RoHS: Compliant; Stock: 4360; Pricing: 1=0.33, 10=0.227, 100=0.12, 500=0.1176 (USD); Case/Package: SMB; China RoHS: Non-Compliant; Composition: Zener; Contact Plating: Nickel; Height: 2.44mm; Lead Free: Lead Free; Length: 5.59mm; Lifecycle Status: Production; Max Operating Temperature: 150°C; Max Reverse Leakage Current: 1µA; Min Operating Temperature: -65°C; Mounting Technology: Surface Mount; Number of Elements: 1; Pins: 2; Number of Positions: 3; Number of Terminals: 2; Number of Unidirectional Channels: 1; Packaging: Cut Tape; Peak Pulse Current: 28A; Peak Reverse Current: 1µA; Polarity: Unidirectional; Power Dissipation: 600W; Power Rating: 600W; REACH SVHC: No; Reverse Breakdown Voltage: 14.4V; Reverse Standoff Voltage: 13V; Reverse Voltage: 13V; Schedule B: 8541100080, 8541100080|8541100080|8541100080|8541100080|8541100080; Termination: SMD/SMT; Voltage Rating (DC): 13V; Width: 3.94mm; ComponentLink1URL: https://datasheet.octopart.com:443/SMBJ13A-Littelfuse-datasheet-180609570.pdf?src-supplier=IHS; ComponentLink1Description: https://datasheet.octopart.com:443/SMBJ13A-Littelfuse-datasheet-180609570.pdf?src-supplier=IHS; ComponentLink2URL: https://datasheet.octopart.com:443/SMBJ13A-Littelfuse-datasheet-98958142.pdf?src-supplier=LKR; ComponentLink2Description: https://datasheet.octopart.com:443/SMBJ13A-Littelfuse-datasheet-98958142.pdf?src-supplier=LKR; ComponentLink3URL: https://datasheet.octopart.com:443/SMBJ13A-Littelfuse-datasheet-145017494.pdf?src-supplier=Farnell; ComponentLink3Description: https://datasheet.octopart.com:443/SMBJ13A-Littelfuse-datasheet-145017494.pdf?src-supplier=Farnell; ComponentLink4URL: https://datasheet.octopart.com:443/SMBJ13A-Littelfuse-datasheet-63710821.pdf?src-supplier=Farnell; ComponentLink4Description: https://datasheet.octopart.com:443/SMBJ13A-Littelfuse-datasheet-63710821.pdf?src-supplier=Farnell; ComponentLink5URL: https://datasheet.octopart.com:443/SMBJ13A-Littelfuse-datasheet-123574.pdf?src-supplier=element14+APAC; ComponentLink5Description: https://datasheet.octopart.com:443/SMBJ13A-Littelfuse-datasheet-123574.pdf?src-supplier=element14+APAC; ComponentLink6URL: https://datasheet.octopart.com:443/SMBJ13A-Littelfuse-datasheet-11045459.pdf?src-supplier=element14+APAC; ComponentLink6Description: https://datasheet.octopart.com:443/SMBJ13A-Littelfuse-datasheet-11045459.pdf?src-supplier=element14+APAC; ComponentLink7URL: https://datasheet.octopart.com:443/SMBJ13A-Littelfuse-datasheet-10854588.pdf?src-supplier=TME; ComponentLink7Description: https://datasheet.octopart.com:443/SMBJ13A-Littelfuse-datasheet-10854588.pdf?src-supplier=TME; ComponentLink8URL: https://datasheet.octopart.com:443/SMBJ13A-Littelfuse-datasheet-871.pdf?src-supplier=DigiKey; ComponentLink8Description: https://datasheet.octopart.com:443/SMBJ13A-Littelfuse-datasheet-871.pdf?src-supplier=DigiKey; ComponentLink9URL: https://datasheet.octopart.com:443/SMBJ13A-Littelfuse-datasheet-170904961.pdf?src-supplier=Future+Electronics; ComponentLink9Description: https://datasheet.octopart.com:443/SMBJ13A-Littelfuse-datasheet-170904961.pdf?src-supplier=Future+Electronics; ComponentLink10URL: https://datasheet.octopart.com:443/SMBJ13A-Littelfuse-datasheet-5319440.pdf?src-supplier=Future+Electronics; ComponentLink10Description: https://datasheet.octopart.com:443/SMBJ13A-Littelfuse-datasheet-5319440.pdf?src-supplier=Future+Electronics; ComponentLink11URL: https://datasheet.octopart.com:443/SMBJ13A-Littelfuse-datasheet-27889791.pdf?src-supplier=Fuses+Unlimited; ComponentLink11Description: https://datasheet.octopart.com:443/SMBJ13A-Littelfuse-datasheet-27889791.pdf?src-supplier=Fuses+Unlimited
footprint DO-214AA (SMB)
pins: 1 K, 2 A

## SMBJ14A-13-F
designator D?
SMBJ Series 26 V 600 W Surface Mount Uni-Directional TVS Diode - DO-214AA; Manufacturer: Diodes; Manufacturer Part Number: SMBJ14A-13-F; Direction: Unidirectional; Reverse Breakdown Voltage: 15.6V; Max Surge Current: 25.8A; Reverse Standoff Voltage: 14V; Clamping Voltage: 23.2V; Max Power Dissipation: 600W; Number of Elements: 1; Test Current: 1mA; Max Reverse Leakage Current: 5uA; Max Breakdown Voltage: 17.9V; Forward Voltage: 5V; Value: 1nF; Number of Channels: 1NUMBER; Operating Supply Voltage: 16V; Peak Reverse Current: 1µA; Power Line Protection: No; Supplier: Digikey; Supplier Part Number: SMBJ14A-FDICT-ND; RoHS: Yes; Category: TVS Diodes; Stock: 21112; Pricing: 1=0.43, 10=0.305, 100=0.1538, 500=0.13628, 1000=0.10605 (USD); Mounting Technology: Surface Mount; Case/Package: SMB; Pins: 2; Min Operating Temperature: -55°C; Max Operating Temperature: 150°C; Packaging: Tape and Reel; Package Quantity: 1; Polarity: Unidirectional; Termination: SMD/SMT; Working Voltage: 14V; Breakdown Voltage: 15.6V; Peak Pulse Current: 25.8A; Peak Pulse Power: 600W; Min Breakdown Voltage: 15.6V; Power Dissipation: 600W; Leakage Current: 5uA; Voltage Rating (DC): 14V; Max Output current: 25.8A; Series: SMBJ; Clamping Voltage-Max: 23.2V; Length: 4.57mm; Width: 3.9mm; Height: 2.62mm; Radiation Hardening: No; Lead Free: Lead Free; RoHS Compliant: Yes; ComponentLink1URL: https://datasheet.ciiva.com/15143/getdatasheetpartid-91658-15143394.pdf?src-supplier=Verical; ComponentLink1Description: https://datasheet.ciiva.com/15143/getdatasheetpartid-91658-15143394.pdf?src-supplier=Verical; ComponentLink2URL: https://datasheet.ciiva.com/16487/ds19002-16487576.pdf?src-supplier=Future+Electronics; ComponentLink2Description: https://datasheet.ciiva.com/16487/ds19002-16487576.pdf?src-supplier=Future+Electronics; Item Type: Diode; China RoHS: Non-Compliant; Composition: Zener; Lifecycle Status: Production; Number of Terminals: 2; Number of Unidirectional Channels: 1; Power Rating: 600W; REACH SVHC: No; Reverse Voltage: 16V; Schedule B: 8541100080, 8541100080|8541100080|8541100080|8541100080|8541100080; ComponentLink3URL: https://datasheet.octopart.com:443/SMBJ16A-Littelfuse-datasheet-180609570.pdf?src-supplier=IHS; ComponentLink3Description: https://datasheet.octopart.com:443/SMBJ16A-Littelfuse-datasheet-180609570.pdf?src-supplier=IHS; ComponentLink4URL: https://datasheet.octopart.com:443/SMBJ16A-Littelfuse-datasheet-10854588.pdf?src-supplier=element14+APAC; ComponentLink4Description: https://datasheet.octopart.com:443/SMBJ16A-Littelfuse-datasheet-10854588.pdf?src-supplier=element14+APAC; ComponentLink5URL: https://datasheet.octopart.com:443/SMBJ16A-Littelfuse-datasheet-5319440.pdf?src-supplier=element14+APAC; ComponentLink5Description: https://datasheet.octopart.com:443/SMBJ16A-Littelfuse-datasheet-5319440.pdf?src-supplier=element14+APAC; ComponentLink6URL: https://datasheet.octopart.com:443/SMBJ16A-Littelfuse-datasheet-63710821.pdf?src-supplier=element14+APAC; ComponentLink6Description: https://datasheet.octopart.com:443/SMBJ16A-Littelfuse-datasheet-63710821.pdf?src-supplier=element14+APAC; ComponentLink7URL: https://datasheet.octopart.com:443/SMBJ16A-Littelfuse-datasheet-98958142.pdf?src-supplier=LKR; ComponentLink7Description: https://datasheet.octopart.com:443/SMBJ16A-Littelfuse-datasheet-98958142.pdf?src-supplier=LKR; ComponentLink8URL: https://datasheet.octopart.com:443/SMBJ16A-Littelfuse-datasheet-145017494.pdf?src-supplier=Newark; ComponentLink8Description: https://datasheet.octopart.com:443/SMBJ16A-Littelfuse-datasheet-145017494.pdf?src-supplier=Newark; ComponentLink9URL: https://datasheet.octopart.com:443/SMBJ16A-Littelfuse-datasheet-11045459.pdf?src-supplier=Newark; ComponentLink9Description: https://datasheet.octopart.com:443/SMBJ16A-Littelfuse-datasheet-11045459.pdf?src-supplier=Newark; ComponentLink10URL: https://datasheet.octopart.com:443/SMBJ16A-Littelfuse-datasheet-165289144.pdf?src-supplier=Electro+Sonic; ComponentLink10Description: https://datasheet.octopart.com:443/SMBJ16A-Littelfuse-datasheet-165289144.pdf?src-supplier=Electro+Sonic; ComponentLink11URL: https://datasheet.octopart.com:443/SMBJ16A-Littelfuse-datasheet-27889791.pdf?src-supplier=Future+Electronics; ComponentLink11Description: https://datasheet.octopart.com:443/SMBJ16A-Littelfuse-datasheet-27889791.pdf?src-supplier=Future+Electronics; ComponentLink12URL: https://datasheet.octopart.com:443/SMBJ16A-Littelfuse-datasheet-871.pdf?src-supplier=Mouser; ComponentLink12Description: https://datasheet.octopart.com:443/SMBJ16A-Littelfuse-datasheet-871.pdf?src-supplier=Mouser
footprint SMB_
pins: 1 A, 2 K

## SMBJ15A
designator D?
TVS DIODE 15VWM 24.4VC DO214AA; Manufacturer: Littelfuse; Manufacturer Part Number: SMBJ15A; Item Type: TVS Diodes; Breakdown Voltage: 17.6V; Clamping Voltage: 24.4V; Direction: Unidirectional; Element Configuration: Single; Forward Voltage: 3.5V; Leakage Current: 1µA; Max Breakdown Voltage: 18.5V; Max Junction Temperature (Tj): 150°C; Max Power Dissipation: 5W; Max Surge Current: 24.6A; Min Breakdown Voltage: 16.7V; Number of Channels: 1; Operating Supply Voltage: 15V; Peak Pulse Power: 600W; Power Line Protection: No; Test Current: 1mA; Supplier: DigiKey; LCSC Part Number: C83846; RoHS: Compliant; Stock: 71675; Pricing: 1=0.26, 10=0.197, 100=0.117, 500=0.115, 1000=0.112 (USD); Case/Package: SMB; China RoHS: Non-Compliant; Composition: Zener; Height: 2.61mm; Lead Free: Lead Free; Length: 4.57mm; Lifecycle Status: Production; Max Operating Temperature: 150°C; Max Reverse Leakage Current: 1µA; Min Operating Temperature: -65°C; Mounting Technology: Surface Mount; Number of Elements: 1; Pins: 2; Number of Terminals: 2; Number of Unidirectional Channels: 1; Packaging: Tape & Reel; Peak Pulse Current: 24.6A; Peak Reverse Current: 1µA; Polarity: Unidirectional; Power Rating: 600W; Radiation Hardening: No; REACH SVHC: No; Reverse Breakdown Voltage: 16.7V; Reverse Standoff Voltage: 15V; Reverse Voltage: 15V; Schedule B: 8541100080, 8541100080|8541100080, 8541100080|8541100080|8541100080, 8541100080|8541100080|8541100080|8541100080; Termination: SMD/SMT; Voltage Rating (DC): 15V; Width: 3.94mm; ComponentLink1URL: https://datasheet.octopart.com:443/SMBJ15A-Littelfuse-datasheet-180609570.pdf?src-supplier=IHS; ComponentLink1Description: https://datasheet.octopart.com:443/SMBJ15A-Littelfuse-datasheet-180609570.pdf?src-supplier=IHS; ComponentLink2URL: https://datasheet.octopart.com:443/SMBJ15A-Littelfuse-datasheet-27889791.pdf?src-supplier=Upverter; ComponentLink2Description: https://datasheet.octopart.com:443/SMBJ15A-Littelfuse-datasheet-27889791.pdf?src-supplier=Upverter; ComponentLink3URL: https://datasheet.octopart.com:443/SMBJ15A-Littelfuse-datasheet-98958142.pdf?src-supplier=Burklin+Elektronik; ComponentLink3Description: https://datasheet.octopart.com:443/SMBJ15A-Littelfuse-datasheet-98958142.pdf?src-supplier=Burklin+Elektronik; ComponentLink4URL: https://datasheet.octopart.com:443/SMBJ15A-Littelfuse-datasheet-10854588.pdf?src-supplier=element14+APAC; ComponentLink4Description: https://datasheet.octopart.com:443/SMBJ15A-Littelfuse-datasheet-10854588.pdf?src-supplier=element14+APAC; ComponentLink5URL: https://datasheet.octopart.com:443/SMBJ15A-Littelfuse-datasheet-5319440.pdf?src-supplier=element14+APAC; ComponentLink5Description: https://datasheet.octopart.com:443/SMBJ15A-Littelfuse-datasheet-5319440.pdf?src-supplier=element14+APAC; ComponentLink6URL: https://datasheet.octopart.com:443/SMBJ15A-Littelfuse-datasheet-123574.pdf?src-supplier=Farnell; ComponentLink6Description: https://datasheet.octopart.com:443/SMBJ15A-Littelfuse-datasheet-123574.pdf?src-supplier=Farnell; ComponentLink7URL: https://datasheet.octopart.com:443/SMBJ15A-Littelfuse-datasheet-145017494.pdf?src-supplier=Farnell; ComponentLink7Description: https://datasheet.octopart.com:443/SMBJ15A-Littelfuse-datasheet-145017494.pdf?src-supplier=Farnell; ComponentLink8URL: https://datasheet.octopart.com:443/SMBJ15A-Littelfuse-datasheet-63710821.pdf?src-supplier=Farnell; ComponentLink8Description: https://datasheet.octopart.com:443/SMBJ15A-Littelfuse-datasheet-63710821.pdf?src-supplier=Farnell; ComponentLink9URL: https://datasheet.octopart.com:443/SMBJ15A-Littelfuse-datasheet-871.pdf?src-supplier=Newark; ComponentLink9Description: https://datasheet.octopart.com:443/SMBJ15A-Littelfuse-datasheet-871.pdf?src-supplier=Newark; ComponentLink10URL: https://datasheet.octopart.com:443/SMBJ15A-Littelfuse-datasheet-165289144.pdf?src-supplier=RS+(Formerly+Allied+Electronics); ComponentLink10Description: https://datasheet.octopart.com:443/SMBJ15A-Littelfuse-datasheet-165289144.pdf?src-supplier=RS+(Formerly+Allied+Electronics); ComponentLink11URL: https://datasheet.octopart.com:443/SMBJ15A-Littelfuse-datasheet-22888.pdf?src-supplier=RS+(Formerly+Allied+Electronics); ComponentLink11Description: https://datasheet.octopart.com:443/SMBJ15A-Littelfuse-datasheet-22888.pdf?src-supplier=RS+(Formerly+Allied+Electronics); ComponentLink12URL: https://datasheet.octopart.com:443/SMBJ15A-Littelfuse-datasheet-15687820.pdf?src-supplier=Future+Electronics; ComponentLink12Description: https://datasheet.octopart.com:443/SMBJ15A-Littelfuse-datasheet-15687820.pdf?src-supplier=Future+Electronics; ComponentLink13URL: https://datasheet.octopart.com:443/SMBJ15A-Littelfuse-datasheet-10536905.pdf?src-supplier=Jameco; ComponentLink13Description: https://datasheet.octopart.com:443/SMBJ15A-Littelfuse-datasheet-10536905.pdf?src-supplier=Jameco
footprint DO-214AA (SMB)
pins: 1 K, 2 A

## SMBJ16A
designator D?
TVS DIODE 16VWM 26VC DO214AA; Manufacturer: Littelfuse Inc.; Manufacturer Part Number: SMBJ16A; LCSC Part Number: C151254; Item Type: Diode
footprint DO-214AA (SMB)
pins: 1 K, 2 A

## SMBJ20A
designator D?
18.5A 32.4V 22.2V 20V DO-214AA Electrostatic and Surge Protection (TVS/ESD) ROHS; Manufacturer: Slkor; Manufacturer Part Number: SMBJ20A; Package: DO-214AA; LCSC Part Number: C2760886; Item Type: (TVS/ESD); ComponentLink1Description: LCSC; ComponentLink1URL: https://www.lcsc.com/product-detail/Electrostatic-and-Surge-Protection-TVS-ESD_Slkor-SLKORMICRO-Elec-SMBJ20A_C2760886.html
footprint SMB_
pins: 1 A, 2 K

## SMBJ20A/TR13
designator D?
18.6A 600W 32.4V 22.2V Unidirectional 20V SMB(DO-214AA) ESD and Surge Protection (TVS/ESD) ROHS; Manufacturer: Yageo; Manufacturer Part Number: SMBJ20A/TR13; Item Type: Diodes; Supplier: Digikey; LCSC Part Number: C309948; RoHS: Yes; Stock: 6000; Pricing: 1=0.38, 10=0.232, 25=0.1924, 100=0.1461, 250=0.1232, 500=0.10908, 1000=0.09725 (USD); RoHS Compliant: Yes
footprint SMB_
pins: 1 A, 2 K

## SMBJ24A
designator D?
SMB(DO-214AA); Manufacturer: SMC; Manufacturer Part Number: SMBJ24A; Item Type: TVS Diode; Package: SMB(DO-214AA); LCSC Part Number: C493201
footprint SMB_
pins: 1 A, 2 K

## SMBJ26A-13-F
designator D?
TVS DIODE 26VWM 42.1VC SMB; Manufacturer: Diodes; Manufacturer Part Number: SMBJ26A-13-F; Item Type: TVS Diodes; Supplier: Future Electronics; Supplier Part Number: 3363900; RoHS: Yes; Stock: 9000; Pricing: 3000=0.0717, 9000=0.069, 15000=0.0677, 30000=0.0661, 60000=0.0635 (USD); ComponentLink1URL: https://datasheet.ciiva.com/15143/getdatasheetpartid-118169-15143570.pdf?src-supplier=Verical; ComponentLink1Description: https://datasheet.ciiva.com/15143/getdatasheetpartid-118169-15143570.pdf?src-supplier=Verical; ComponentLink2URL: https://datasheet.ciiva.com/16211/ds19002-16211003.pdf?src-supplier=Future+Electronics; ComponentLink2Description: https://datasheet.ciiva.com/16211/ds19002-16211003.pdf?src-supplier=Future+Electronics; LCSC Part Number: C135062
footprint SMB_
pins: 1 A, 2 K

## SMBJ26CA
designator D?
SMB(DO-214AA) TVS ROHS; Manufacturer: MSKSEMI; Manufacturer Part Number: SMBJ26CA; Item Type: Diode; Package: SMB(DO-214AA); LCSC Part Number: C5331111; ComponentLink1Description: LCSC; ComponentLink1URL: https://www.lcsc.com/product-detail/TVS_MSKSEMI-SMBJ26CA_C5331111.html
footprint SMB Bi Directional
pins: 1 A, 2 K